# Altium footprint library Resistor.PcbLib: 85 footprints (part 6 of 6)
Each footprint in its own frame and in the unit in brackets; x right, y up, seen from the top. Pads: shape width x height; smd on the part's side, far side on the other; paste and mask are expansions set on the pad; w line width, h text height; cw(c..) or ccw(c..) is an arc to the next point about the centre after c.
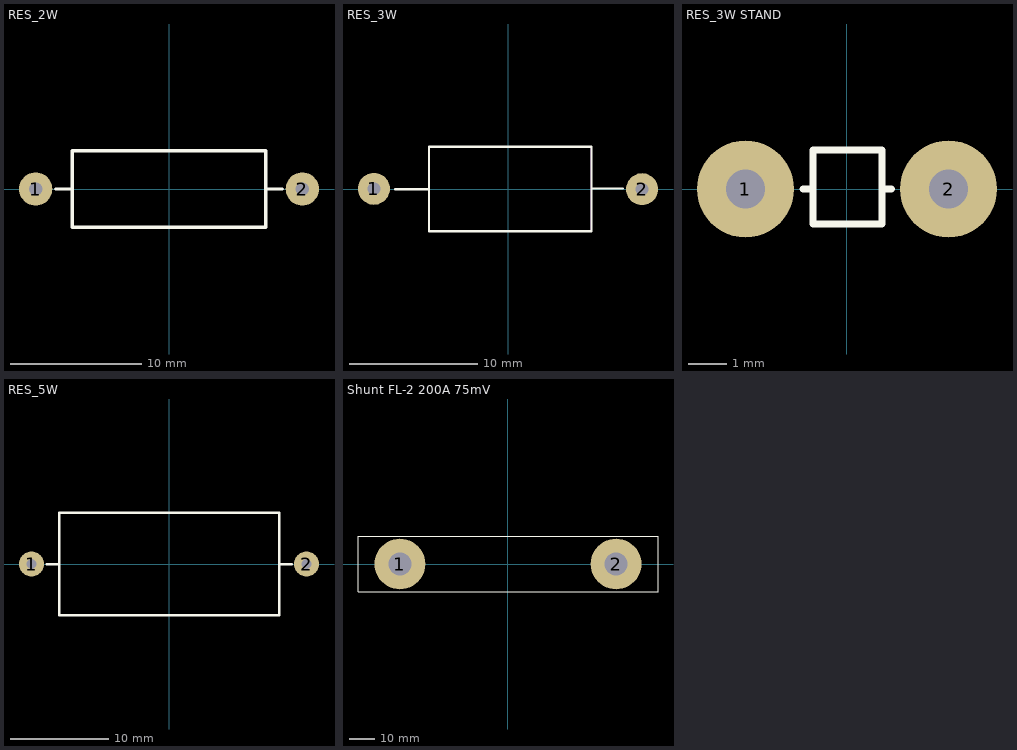
[diagram p5: the footprints below, top view; thin cyan lines are the x and y axes]

## RES_2W [mil] "R2W"
pads (2):
  round 100 hole 40: 1(-400,0) 2(400,0)
Top Overlay:
  lines w10: -340,0 -290,0 ; 290,0 340,0 ; -290,0 -290,-115 290,-115 290,115 -290,115 -290,0
Top Designator:
  text ".Designator" at -146.08,-13.54 h60
Mechanical 15:
  lines w1.97: -290,-114.9 290,-114.9 290,115 -290,115 -290,-114.9
3D body "User Library-RES-2W.STEP": height 216.54, standoff -118.11, extent -413.78,-110.23 413.78,106.3

## RES_3W [mm] "R3W, 2 pin"
height 5.08
pads (2):
  round 2.5 hole 1: 1(-10.503,0.013) 2(10.503,-0.013)
Top Overlay:
  lines w0.178: -8.826,-0.013 -6.185,-0.013 ; 6.566,0.038 9.004,0.038 ; -6.185,-3.315 6.54,-3.315 6.54,3.315 -6.185,3.315 -6.185,0.038 -6.185,-3.315
Top Designator:
  text ".Designator" at -3.71,-0.344 h1.52
Mechanical 15:
  lines w0.05: -6.185,-3.315 6.541,-3.315 6.541,3.315 -6.185,3.315 -6.185,-3.315
3D body "SW3dPS-AXIAL_RESISTOR(3W).STEP": height 8.29, standoff -2, extent -11.113,-3.289 11.087,3.311

## RES_3W STAND [mm] "R3W, 2 pin"
height 5.08
pads (2):
  round 2.5 hole 1: 1(-2.619,0) 2(2.619,0)
Top Overlay:
  lines w0.178: -1.133,0 -0.879,0 ; 1.153,0 0.899,0 ; -0.879,0 -0.879,-0.902 0.899,-0.902 0.899,0 ; -0.879,0 -0.879,1.003 0.899,1.003 0.899,0
Top Designator:
  text ".Designator" at 0.354,-3.71 h1.52
Mechanical 15:
  lines w0.05: -1.133,0 -0.879,0 ; 0.899,-0.013 1.153,-0.013 ; -0.879,0 -0.879,-0.013 -0.879,-0.902 0.899,-0.902 0.899,1.003 -0.879,1.003 -0.879,0
3D body "RES_AV_3W_200mil_0R_5%.STEP": height 22.4, standoff -3.75, extent -2.861,-3.02 5.637,3.02

## RES_5W [mil] "R5W"
pads (2):
  round 100 hole 40: 1(-550,0) 2(550,0)
Top Overlay:
  lines w10: -490,0 -440,0 ; 440,0 490,0 ; -440,0 -440,205 440,205 440,-205 -440,-205 -440,0
Top Designator:
  text ".Designator" at -146.08,-13.54 h60
Mechanical 15:
  lines w1.97: -440,-205 440,-205 440,205 -440,205 -440,-205
3D body "User Library-Cement Fixed Resistors 5W 1K5 PCB Horizontal.STEP": height 354.83, standoff -141.23, extent -565,-196.85 564.53,196.85

## Shunt FL-2 200A 75mV [mm]
pads (2):
  round 20 hole 9: 1(-42.5,0) 2(42.5,0)
Top Overlay:
  lines w0.15: -59,-11 59,-11 59,11 -59,11 -59,-11
3D body "Part1.STEP": height 22, standoff 0, extent -59,-11 59,11